# Altium schematic symbol library SamacSys.SchLib: 58 symbols
Pins are listed as number, name and electrical type; pins without a type are passive.

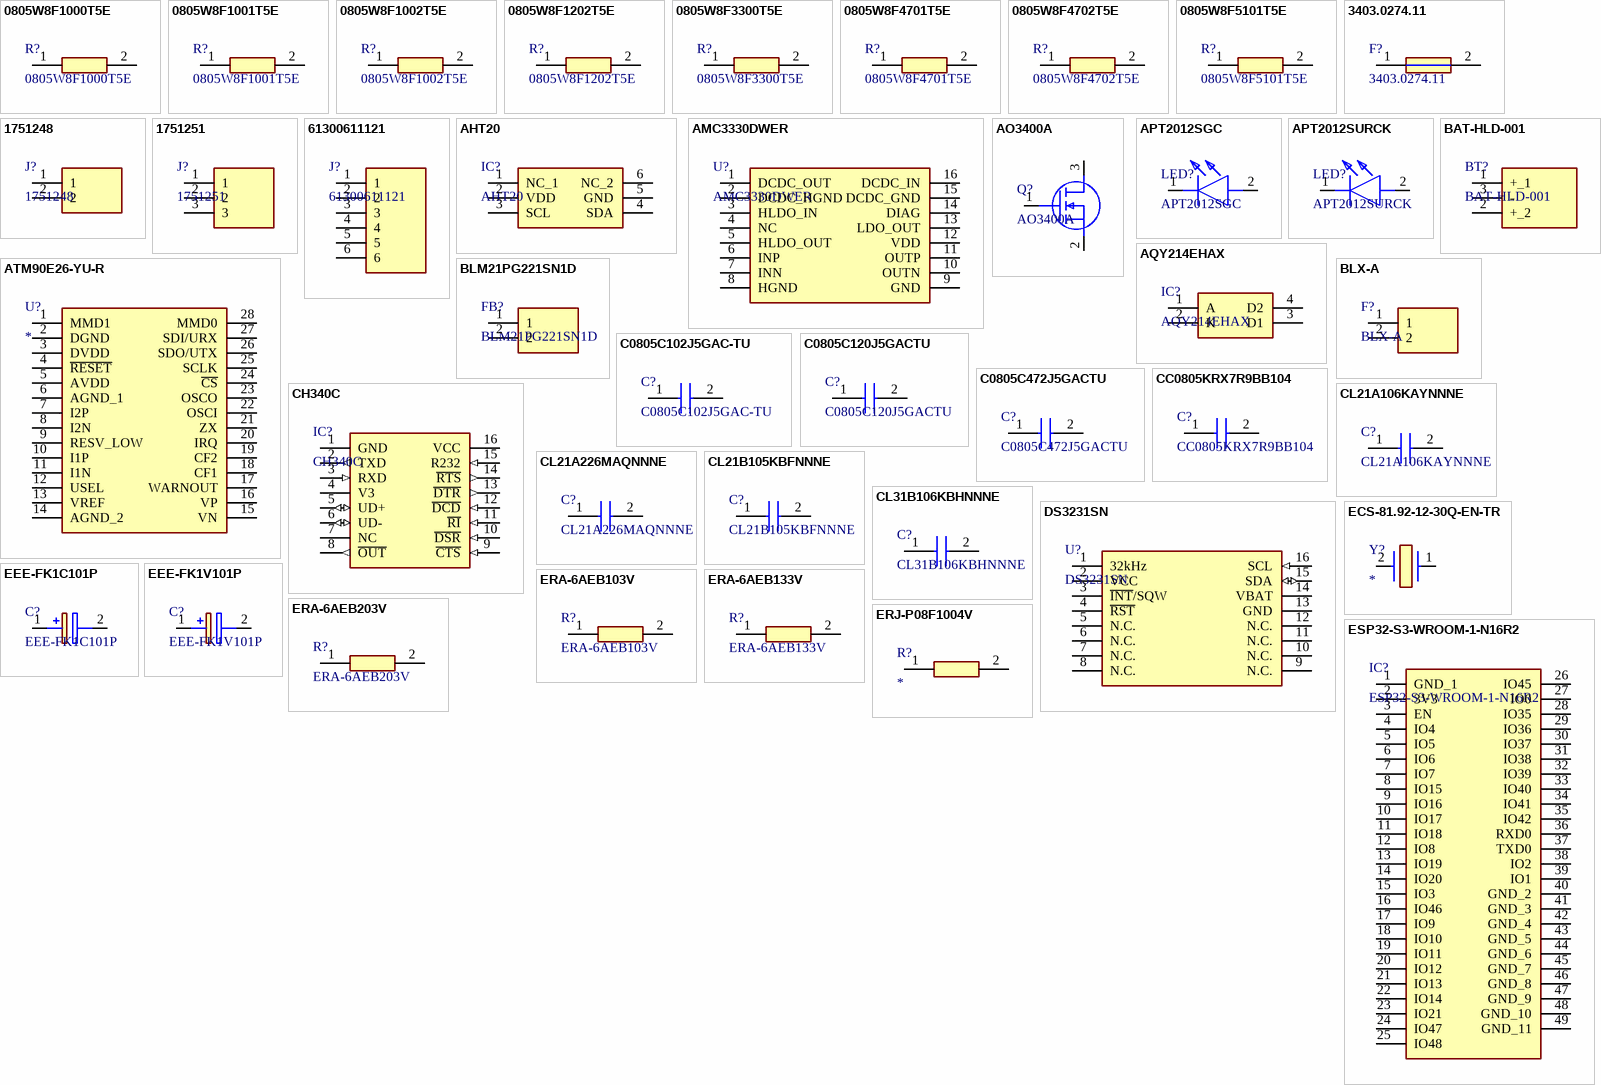
[diagram p0: symbols 0805W8F1000T5E to ESP32-S3-WROOM-1-N16R2]

## 0805W8F1000T5E
designator R?
Resistor 100 Ohm 1% 125 mW 0805; Manufacturer_Name: UNI-ROYAL; Value: 100R; Assembly: JLCPCB; Manufacturer_Part_Number: 0805W8F1000T5E; Supplier: JLCPCB; Supplier PN: LCSC C17408
footprint RESC2012X60N
pins: 1, 2

## 0805W8F1001T5E
designator R?
Resistor 1 kOhm 1% 125 mW 0805; Manufacturer_Name: UNI-ROYAL; Assembly: JLCPCB; Value: 1k; Manufacturer_Part_Number: 0805W8F1001T5E; Supplier: JLCPCB; Supplier PN: LCSC C17513
footprint RESC2012X60N
pins: 1, 2

## 0805W8F1002T5E
designator R?
Resistor 10 kOhm 1% 125 mW 0805; Manufacturer_Name: UNI-ROYAL; Value: 10k; Assembly: JLCPCB; Manufacturer_Part_Number: 0805W8F1002T5E; Supplier: JLCPCB; Supplier PN: LCSC C17414
footprint RESC2012X60N
pins: 1, 2

## 0805W8F1202T5E
designator R?
Resistor 12 kOhm 1% 125 mW 0805; Manufacturer_Name: UNI-ROYAL; Value: 12k; Assembly: JLCPCB; Manufacturer_Part_Number: 0805W8F1202T5E; Supplier: JLCPCB; Supplier PN: LCSC C17444
footprint RESC2012X60N
pins: 1, 2

## 0805W8F3300T5E
designator R?
Resistor 330 Ohm 1% 125 mW 0805; Manufacturer_Name: UNI-ROYAL; Value: 330R; Assembly: JLCPCB; Manufacturer_Part_Number: 0805W8F3300T5E; Supplier: JLCPCB; Supplier PN: LCSC C17630
footprint RESC2012X60N
pins: 1, 2

## 0805W8F4701T5E
designator R?
Resistor 4.7 kOhm 1% 125 mW 0805; Manufacturer_Name: UNI-ROYAL; Value: 4.7k; Assembly: JLCPCB; Manufacturer_Part_Number: 0805W8F4701T5E; Supplier: JLCPCB; Supplier PN: LCSC C17673
footprint RESC2012X60N
pins: 1, 2

## 0805W8F4702T5E
designator R?
Resistor 47 kOhm 1% 125 mW 0805; Manufacturer_Name: UNI-ROYAL; Value: 47k; Assembly: JLCPCB; Manufacturer_Part_Number: 0805W8F4702T5E; Supplier: JLCPCB; Supplier PN: LCSC C17713
footprint RESC2012X60N
pins: 1, 2

## 0805W8F5101T5E
designator R?
Resistor 5.1 kOhm 1% 125 mW 0805; Manufacturer_Name: UNI-ROYAL; Value: 5.1k; Assembly: JLCPCB; Manufacturer_Part_Number: 0805W8F5101T5E; Supplier: JLCPCB; Supplier PN: LCSC C27834
footprint RESC2012X60N
pins: 1, 2

## 3403.0274.11
designator F?
Fusible SMD UMT-H T1A 277 VAC, ruptura 1500 A (bolsa); Manufacturer_Name: Schurter; Assembly: JLCPCB; Manufacturer_Part_Number: 3403.0274.11; Supplier: JLCPCB; Supplier PN: LCSC C6384960; Value: T1A 277VAC
footprint 3403027423
pins: 1, 2

## 1751248
designator J?
Connector; Manufacturer_Name: Phoenix Contact; Assembly: JLCPCB; Value: 2P 3.5mm; Datasheet Link: https://www.phoenixcontact.com/en-us/products/printed-circuit-board-terminal-mkds-1-2-35-1751248?type=pdf; Height: 8.65mm; Manufacturer_Part_Number: 1751248; Supplier: JLCPCB; Supplier PN: LCSC C89122
footprint 1751248
pins: 1, 2

## 1751251
designator J?
Connector; Manufacturer_Name: Phoenix Contact; Value: 3P 3.5mm; Assembly: JLCPCB; Supplier: JLCPCB; Supplier PN: LCSC C91152; Datasheet Link: https://www.phoenixcontact.com/en-us/products/printed-circuit-board-terminal-mkds-1-3-35-1751251?type=pdf; Height: 8.65mm; Manufacturer_Part_Number: 1751251
footprint 1751251
pins: 1, 2, 3

## 61300611121
designator J?
Connector; Manufacturer_Name: Wurth Elektronik; Value: 1x6 2.54mm; Assembly: JLCPCB; Supplier: JLCPCB; Supplier PN: LCSC C5444523; Datasheet Link: https://www.we-online.com/components/products/datasheet/61300611121.pdf; Height: 8.94mm; Manufacturer_Part_Number: 61300611121
footprint HDRV6W79P0X254_1X6_1524X254X894P
pins: 1, 2, 3, 4, 5, 6

## AHT20
designator IC?
Temperature and humidity sensor, I2C 0x38, DFN-6 3x3 mm; Manufacturer_Name: Aosong; Value: T/HR I2C 0x38; Assembly: JLCPCB; Supplier: JLCPCB; Supplier PN: LCSC C2757850; Datasheet Link: https://www.lcsc.com/datasheet/C2757850.pdf; Height: 1.1mm; Manufacturer_Part_Number: AHT20
footprint AHT20
pins: 1 NC_1, 2 VDD, 3 SCL, 4 SDA, 5 GND, 6 NC_2

## AMC3330DWER
designator U?
Amplificador aislado +-1 V con DC/DC integrado, aislamiento reforzado, SOIC-16 DWE (carrete); Manufacturer_Name: Texas Instruments; Assembly: JLCPCB; Value: ±1V iso amp; Manufacturer_Part_Number: AMC3330DWER; Supplier: JLCPCB; Supplier PN: LCSC C2999368
footprint SOIC127P1030X265-16N
pins: 1 DCDC_OUT, 2 DCDC_HGND, 3 HLDO_IN, 4 NC, 5 HLDO_OUT, 6 INP, 7 INN, 8 HGND, 9 GND, 10 OUTN, 11 OUTP, 12 VDD, 13 LDO_OUT, 14 DIAG, 15 DCDC_GND, 16 DCDC_IN

## AO3400A
designator Q?
MOSFET N-channel 30V 5.7A, Rds(on) 48mR max at Vgs 2.5V, SOT-23; Manufacturer_Name: Alpha & Omega Semiconductor; Value: NMOS 30V 5.7A; Assembly: JLCPCB; Supplier: JLCPCB; Supplier PN: LCSC C20917; Datasheet Link: https://www.aosmd.com/res/datasheets/AO3400A.pdf; Manufacturer_Part_Number: AO3400A
footprint SOT96P237X111-3N
pins: 1 G, 2 S, 3 D

## APT2012SGC
designator LED?
LED; Manufacturer_Name: Kingbright; Assembly: JLCPCB; Value: verde; Datasheet Link: http://www.us.kingbright.com/images/catalog/SPEC/APT2012SGC.pdf; Height: 0.85mm; Manufacturer_Part_Number: APT2012SGC; Supplier: JLCPCB; Supplier PN: LCSC C5353439
footprint LEDC2012X85N
pins: 1 K, 2 A

## APT2012SURCK
designator LED?
LED; Manufacturer_Name: Kingbright; Assembly: JLCPCB; Value: rojo; Manufacturer_Part_Number: APT2012SURCK; Supplier: JLCPCB; Supplier PN: LCSC C5875730
footprint LEDC2012X85N
pins: 1 K, 2 A

## AQY214EHAX
designator IC?
PhotoMOS 1 Form A (NO), 400 V 120 mA, reinforced insulation 5000 Vrms, SMD DIP-4; Manufacturer_Name: Panasonic; Value: PhotoMOS NA; Assembly: JLCPCB; Supplier: JLCPCB; Supplier PN: LCSC C371971; Manufacturer_Part_Number: AQY214EHAX
footprint SOP254P962X315-4N
pins: 1 A, 2 K, 3 D1, 4 D2

## ATM90E26-YU-R
designator U?
Integrated Circuit; Manufacturer_Name: Microchip; Manufacturer_Part_Number: ATM90E26-YU-R; Assembly: JLCPCB; Value: energy meter; Datasheet Link: http://ww1.microchip.com/downloads/en/DeviceDoc/Atmel-46002-SE-M90E26-Datasheet.pdf; Height: 1.99mm; Supplier: JLCPCB; Supplier PN: LCSC C616398
footprint SOP65P778X199-28N
pins: 1 MMD1, 2 DGND, 3 DVDD, 4 ~{RESET}, 5 AVDD, 6 AGND_1, 7 I2P, 8 I2N, 9 RESV_LOW, 10 I1P, 11 I1N, 12 USEL, 13 VREF, 14 AGND_2, 15 VN, 16 VP, 17 WARNOUT, 18 CF1, 19 CF2, 20 IRQ, 21 ZX, 22 OSCI, 23 OSCO, 24 ~{CS}, 25 SCLK, 26 SDO/UTX, 27 SDI/URX, 28 MMD0

## BAT-HLD-001
designator BT?
Battery holder CR2032, SMD; Manufacturer_Name: TE Connectivity; Assembly: JLCPCB; Value: CR2032; Supplier: JLCPCB; Supplier PN: LCSC C7501066; Datasheet Link: https://www.te.com/commerce/DocumentDelivery/DDEController?Action=showdoc&DocId=Customer+Drawing%7FC-BAT-HLD-001-xx%7FE%7Fpdf%7FEnglish%7FENG_CD_C-BAT-HLD-001-xx_E.pdf%7FBAT-HLD-001; Height: 4.3mm; Manufacturer_Part_Number: BAT-HLD-001
footprint BATHLD001
pins: 1 +_1, 2 +_2, 3 -

## BLM21PG221SN1D
designator FB?
Ferrite Bead; Manufacturer_Name: Murata; Assembly: JLCPCB; Value: 220R@100MHz; Datasheet Link: https://datasheet.datasheetarchive.com/originals/dk/DKDS-31/605570.pdf; Height: 1.05mm; Manufacturer_Part_Number: BLM21PG221SN1D; Supplier: JLCPCB; Supplier PN: LCSC C85840
footprint BEADC2012X105N
pins: 1, 2

## BLX-A
designator F?
Portafusible 5x20 mm para PCB, 2 pines a 22 mm (XC Electronics BLX-A, LCSC C3131); Assembly: DNP; Value: 5x20 6.3A 250V; Manufacturer_Name: XC Electronics; Manufacturer_Part_Number: BLX-A; Supplier: Sigma; Supplier PN: BLX-A
footprint BLX-A_5X20
pins: 1, 2

## C0805C102J5GAC-TU
designator C?
Capacitor; Manufacturer_Name: KEMET; Manufacturer_Part_Number: C0805C102J5GACTU; Assembly: JLCPCB; Value: 1nF 50V C0G; Datasheet Link: https://www.kemet.com/specsheet/C0805C102J5GACTU; Height: 0.88mm; Supplier: JLCPCB; Supplier PN: LCSC C2167084
footprint CAPC2012X88N
pins: 1, 2

## C0805C120J5GACTU
designator C?
Capacitor; Manufacturer_Name: KEMET; Assembly: JLCPCB; Value: 12pF 50V C0G; Datasheet Link: https://www.kemet.com/specsheet/C0805C120J5GACTU; Height: 0.88mm; Manufacturer_Part_Number: C0805C120J5GACTU; Supplier: JLCPCB; Supplier PN: LCSC C2168859
footprint CAPC2012X88N
pins: 1, 2

## C0805C472J5GACTU
designator C?
Capacitor; Manufacturer_Name: KEMET; Assembly: JLCPCB; Value: 4.7nF 50V C0G; Datasheet Link: https://www.kemet.com/specsheet/C0805C472J5GACTU; Height: 0.88mm; Manufacturer_Part_Number: C0805C472J5GACTU; Supplier: JLCPCB; Supplier PN: LCSC C2170898
footprint CAPC2012X88N
pins: 1, 2

## CC0805KRX7R9BB104
designator C?
Capacitor 100 nF 50 V X7R 10% 0805; Manufacturer_Name: YAGEO; Assembly: JLCPCB; Manufacturer_Part_Number: CC0805KRX7R9BB104; Supplier: JLCPCB; Supplier PN: LCSC C49678; Value: 100nF 50V X7R
footprint CAPC2012X88N
pins: 1, 2

## CH340C
designator IC?
USB to UART bridge; Manufacturer_Name: WCH; Value: USB-UART; Assembly: JLCPCB; Supplier PN: LCSC C84681; Supplier: JLCPCB; Datasheet Link: https://www.wch-ic.com/downloads/CH340DS1_PDF.html; Height: 1.75mm; Manufacturer_Part_Number: CH340C
footprint SOIC127P600X175-16N
pins: 1 GND (power), 2 TXD (out), 3 RXD (in), 4 V3 (power), 5 UD+ (io), 6 UD- (io), 7 NC, 8 ~{OUT} (out), 9 ~{CTS} (in), 10 ~{DSR} (in), 11 ~{RI} (in), 12 ~{DCD} (in), 13 ~{DTR} (out), 14 ~{RTS} (out), 15 R232 (in), 16 VCC (power)

## CL21A106KAYNNNE
designator C?
Capacitor; Manufacturer_Name: Samsung Electro-Mechanics; Assembly: JLCPCB; Value: 10uF 25V; Datasheet Link: https://datasheet.datasheetarchive.com/originals/distributors/Datasheets_SAMA/6a45835c9b7400e9b49c55c38a8ff4a2.pdf; Height: 1.45mm; Manufacturer_Part_Number: CL21A106KAYNNNE; Supplier: JLCPCB; Supplier PN: LCSC C15850
footprint CAPC2012X145N
pins: 1, 2

## CL21A226MAQNNNE
designator C?
Capacitor; Manufacturer_Name: Samsung Electro-Mechanics; Assembly: JLCPCB; Value: 22uF 25V; Datasheet Link: https://datasheet.datasheetarchive.com/originals/distributors/Datasheets-DGA10/2406310.pdf; Height: 1.4mm; Manufacturer_Part_Number: CL21A226MAQNNNE; Supplier: JLCPCB; Supplier PN: LCSC C45783
footprint CAPC2012X140N
pins: 1, 2

## CL21B105KBFNNNE
designator C?
Capacitor 1 uF 50 V X7R 10% 0805; Manufacturer_Name: Samsung Electro-Mechanics; Assembly: JLCPCB; Manufacturer_Part_Number: CL21B105KBFNNNE; Supplier: JLCPCB; Supplier PN: LCSC C28323; Value: 1uF 50V X7R
footprint CAPC2012X88N
pins: 1, 2

## CL31B106KBHNNNE
designator C?
Capacitor; Manufacturer_Name: Samsung Electro-Mechanics; Assembly: JLCPCB; Value: 10uF 50V; Datasheet Link: https://datasheet.datasheetarchive.com/originals/distributors/DKDS-19/375194.pdf; Height: 1.8mm; Manufacturer_Part_Number: CL31B106KBHNNNE; Supplier: JLCPCB; Supplier PN: LCSC C89632
footprint CAPC3216X180N
pins: 1, 2

## DS3231SN
designator U?
I2C RTC with integrated TCXO and crystal, VBAT, SO-16W; Manufacturer_Name: Analog Devices; Manufacturer_Part_Number: DS3231SN#T&R; Assembly: JLCPCB; Value: RTC TCXO 2ppm; Datasheet Link: https://www.analog.com/media/en/technical-documentation/data-sheets/DS3231.pdf; Height: 2.65mm; Supplier: JLCPCB; Supplier PN: LCSC C9866
footprint SOIC127P1030X265-16N
pins: 1 32kHz (oc), 2 VCC (power), 3 ~{INT}/SQW (oc), 4 ~{RST} (oc), 5 N.C., 6 N.C., 7 N.C., 8 N.C., 9 N.C., 10 N.C., 11 N.C., 12 N.C., 13 GND (power), 14 VBAT (power), 15 SDA (io), 16 SCL (in)

## ECS-81.92-12-30Q-EN-TR
designator Y?
Crystal or Oscillator; Manufacturer_Name: ECS; Manufacturer_Part_Number: ECS-81.92-12-30Q-EN-TR; Assembly: JLCPCB; Value: 8.192MHz 12pF; Datasheet Link: https://datasheet.datasheetarchive.com/originals/distributors/Datasheets_SAMA/a25c19192314839168edce8dcea0d59f.pdf; Height: 1.1mm; Supplier: JLCPCB; Supplier PN: LCSC C2450755
footprint ECS81921230QENTR
pins: 1 IN/OUT, 2 OUT/IN

## EEE-FK1C101P
designator C?
Capacitor Polarised; Manufacturer_Name: Panasonic; Assembly: JLCPCB; Value: 100uF 16V; Datasheet Link: http://industrial.panasonic.com/cdbs/www-data/pdf/RDE0000/ABA0000C1181.pdf; Height: 7.8mm; Manufacturer_Part_Number: EEE-FK1C101P; Supplier: JLCPCB; Supplier PN: LCSC C128532
footprint EEE1AA101SP
pins: 1 +, 2 -

## EEE-FK1V101P
designator C?
Capacitor Polarised; Manufacturer_Name: Panasonic; Assembly: JLCPCB; Value: 100uF 35V; Datasheet Link: http://industrial.panasonic.com/cdbs/www-data/pdf/RDE0000/ABA0000C1181.pdf; Height: 10.8mm; Manufacturer_Part_Number: EEE-FK1V101P; Supplier: JLCPCB; Supplier PN: LCSC C128462
footprint EEHZT1E331UP
pins: 1 +, 2 -

## ERA-6AEB103V
designator R?
Resistor; Manufacturer_Name: Panasonic; Value: 10k 0.1%; Assembly: JLCPCB; Height: 0.55mm; Manufacturer_Part_Number: ERA-6AEB103V; Supplier: JLCPCB; Supplier PN: LCSC C191101
footprint RESC2012X60N
pins: 1, 2

## ERA-6AEB133V
designator R?
Resistor; Manufacturer_Name: Panasonic; Value: 13k 0.1%; Assembly: JLCPCB; Height: 0.55mm; Manufacturer_Part_Number: ERA-6AEB133V; Supplier: JLCPCB; Supplier PN: LCSC C445658
footprint RESC2012X60N
pins: 1, 2

## ERA-6AEB203V
designator R?
Resistor; Manufacturer_Name: Panasonic; Value: 20k 0.1%; Assembly: JLCPCB; Height: 0.55mm; Manufacturer_Part_Number: ERA-6AEB203V; Supplier: JLCPCB; Supplier PN: LCSC C473304
footprint RESC2012X60N
pins: 1, 2

## ERJ-P08F1004V
designator R?
Resistor; Manufacturer_Name: Panasonic; Manufacturer_Part_Number: ERJ-P08F1004V; Assembly: JLCPCB; Value: 1M 1206; Datasheet Link: http://industrial.panasonic.com/cdbs/www-data/pdf/RDO0000/AOA0000C331.pdf; Height: 0.7mm; Supplier: JLCPCB; Supplier PN: LCSC C41369755
footprint ERJP08_(1206)
pins: 1, 2

## ESP32-S3-WROOM-1-N16R2
designator IC?
Integrated Circuit; Manufacturer_Name: Espressif Systems; Value: N16R2 16MB/2MB; Assembly: JLCPCB; Supplier: JLCPCB; Supplier PN: LCSC C2913205; Datasheet Link: https://www.espressif.com/sites/default/files/documentation/esp32-s3-wroom-1_wroom-1u_datasheet_en.pdf; Height: 3.25mm; Manufacturer_Part_Number: ESP32-S3-WROOM-1-N16R2
footprint ESP32S3WROOM1N16R2
pins: 1 GND_1, 2 3V3, 3 EN, 4 IO4, 5 IO5, 6 IO6, 7 IO7, 8 IO15, 9 IO16, 10 IO17, 11 IO18, 12 IO8, 13 IO19, 14 IO20, 15 IO3, 16 IO46, 17 IO9, 18 IO10, 19 IO11, 20 IO12, 21 IO13, 22 IO14, 23 IO21, 24 IO47, 25 IO48, 26 IO45, 27 IO0, 28 IO35, 29 IO36, 30 IO37, 31 IO38, 32 IO39, 33 IO40, 34 IO41, 35 IO42, 36 RXD0, 37 TXD0, 38 IO2, 39 IO1, 40 GND_2, 41 GND_3, 42 GND_4, 43 GND_5, 44 GND_6, 45 GND_7, 46 GND_8, 47 GND_9, 48 GND_10, 49 GND_11

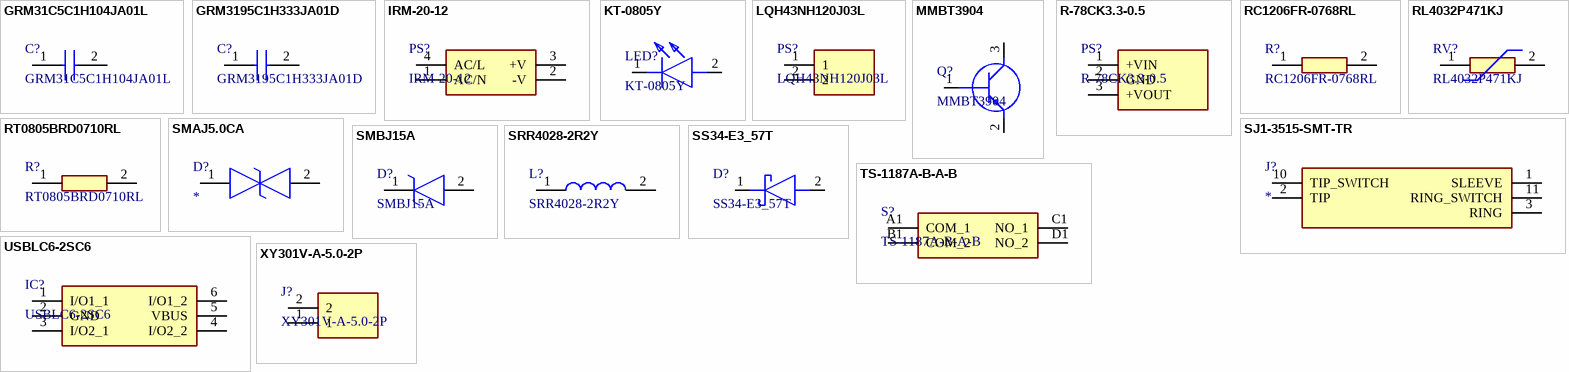
[diagram p1: symbols GRM31C5C1H104JA01L to XY301V-A-5.0-2P]

## GRM31C5C1H104JA01L
designator C?
Capacitor ceramico 100 nF 50 V C0G 5% 1206; Manufacturer_Name: Murata; Assembly: JLCPCB; Manufacturer_Part_Number: GRM31C5C1H104JA01L; Supplier: JLCPCB; Supplier PN: LCSC C97946; Value: 100nF 50V C0G
footprint CAPC3216X180N
pins: 1, 2

## GRM3195C1H333JA01D
designator C?
Capacitor ceramico 33 nF 50 V C0G 5% 1206; Manufacturer_Name: Murata; Assembly: JLCPCB; Manufacturer_Part_Number: GRM3195C1H333JA01D; Supplier: JLCPCB; Supplier PN: LCSC C97930; Value: 33nF 50V C0G
footprint CAPC3216X180N
pins: 1, 2

## IRM-20-12
designator PS?
Power Supply; Manufacturer_Name: Mean Well; Assembly: JLCPCB; Value: 12V 1.8A; Datasheet Link: https://www.meanwell.com/Upload/PDF/IRM-20/IRM-20-SPEC.PDF; Height: 24mm; Manufacturer_Part_Number: IRM-20-12; Supplier: JLCPCB; Supplier PN: LCSC C5278499
footprint IRM2012
pins: 1 AC/N, 2 -V, 3 +V, 4 AC/L

## KT-0805Y
designator LED?
LED yellow 0805, 590 nm; Manufacturer_Name: Hubei KENTO Electronic; Assembly: JLCPCB; Value: amarillo; Manufacturer_Part_Number: KT-0805Y; Supplier: JLCPCB; Supplier PN: LCSC C2296; Datasheet Link: https://www.lcsc.com/datasheet/C2296.pdf
footprint LEDC2012X85N
pins: 1 K, 2 A

## LQH43NH120J03L
designator PS?
Inductor 12 uH 5% 420 mA 0.25 ohm 1812, AEC-Q200; Manufacturer_Name: Murata; Assembly: JLCPCB; Value: 12uH; Manufacturer_Part_Number: LQH43NH120J03L; Supplier: JLCPCB; Supplier PN: LCSC C3224514
footprint RLS126
pins: 1, 2

## MMBT3904
designator Q?
Transistor BJT NPN 40 V 200 mA, SOT-23; Manufacturer_Name: Jiangsu Changjing Electronics; Value: NPN 40V 0.2A; Assembly: JLCPCB; Supplier: JLCPCB; Supplier PN: LCSC C20526; Manufacturer_Part_Number: MMBT3904
footprint SOT96P237X111-3N
pins: 1 B, 2 E, 3 C

## R-78CK3.3-0.5
designator PS?
Regulador conmutado 3.3 V 0.5 A, SIP3; Manufacturer_Name: RECOM Power; Assembly: Manual; Datasheet Link: https://recom-power.com/pdf/Innoline/R-78CK-0.5.pdf; Height: 10.7mm; Manufacturer_Part_Number: R-78CK3.3-0.5; Supplier: Disponible; Supplier PN: -; Value: 3.3V 0.5A
footprint R78CK3305
pins: 1 +VIN, 2 GND, 3 +VOUT

## RC1206FR-0768RL
designator R?
Resistor; Manufacturer_Name: Yageo; Assembly: JLCPCB; Value: 68R 1206; Manufacturer_Part_Number: RC1206FR-0768RL; Supplier: JLCPCB; Supplier PN: LCSC C137238
footprint ERJP08_(1206)
pins: 1, 2

## RL4032P471KJ
designator RV?
Varistor SMD 300 VAC, 470 V, 2500 A (8/20 us), 30 J, 4032; Manufacturer_Name: Ruilon; Assembly: JLCPCB; Value: 300VAC; Manufacturer_Part_Number: RL4032P471KJ; Supplier: JLCPCB; Supplier PN: LCSC C2935514
footprint CU4032
pins: 1, 2

## RT0805BRD0710RL
designator R?
Resistencia de pelicula delgada 10 ohm 0.1% 25 ppm 0805; Manufacturer_Name: Yageo; Value: 10R 0.1%; Assembly: JLCPCB; Manufacturer_Part_Number: RT0805BRD0710RL; Supplier: JLCPCB; Supplier PN: LCSC C865142
footprint RESC2012X60N
pins: 1, 2

## SJ1-3515-SMT-TR
designator J?
Connector; Manufacturer_Name: Same Sky; Manufacturer_Part_Number: SJ1-3515-SMT-TR; Assembly: JLCPCB; Value: jack 3.5mm; Datasheet Link: https://www.sameskydevices.com/product/resource/sj1-351x-smt.pdf; Height: 5.3mm; Supplier: JLCPCB; Supplier PN: LCSC C22359767
footprint SJ13515SMTTR
pins: 1 SLEEVE, 2 TIP, 3 RING, 10 TIP_SWITCH, 11 RING_SWITCH

## SMAJ5.0CA
designator D?
TVS Diode (Bi-directional); Manufacturer_Name: Littelfuse; Manufacturer_Part_Number: SMAJ5.0CA; Assembly: JLCPCB; Value: 5V TVS bidir; Datasheet Link: http://www.littelfuse.com/~/media/electronics/datasheets/tvs_diodes/littelfuse_tvs_diode_smaj_datasheet.pdf.pdf; Height: 2.29mm; Supplier: JLCPCB; Supplier PN: LCSC C83324
footprint DIONM5026X229N
pins: 1, 2

## SMBJ15A
designator D?
TVS Diode (Uni-directional); Manufacturer_Name: Littelfuse; Assembly: JLCPCB; Value: 15V 600W; Datasheet Link: http://www.vishay.com/docs/88392/smbj.pdf; Height: 2.44mm; Manufacturer_Part_Number: SMBJ15A; Supplier: JLCPCB; Supplier PN: LCSC C83846
footprint DIOM5436X244N
pins: 1 K, 2 A

## SRR4028-2R2Y
designator L?
Inductor; Manufacturer_Name: Bourns; Assembly: JLCPCB; Value: 2.2uH; Datasheet Link: https://www.bourns.com/pdfs/SRR4028.pdf; Manufacturer_Part_Number: SRR4028-2R2Y; Supplier: JLCPCB; Supplier PN: LCSC C2041777
footprint SRR4028
pins: 1, 2

## SS34-E3_57T
designator D?
Schottky Diode; Manufacturer_Name: Vishay; Manufacturer_Part_Number: SS34-E3/57T; Assembly: JLCPCB; Value: 40V 3A; Datasheet Link: https://www.vishay.com/docs/88751/ss32.pdf; Height: 2.62mm; Supplier: JLCPCB; Supplier PN: LCSC C13354
footprint DIOM7959X262N
pins: 1 K, 2 A

## TS-1187A-B-A-B
designator S?
Tact switch 5.1 x 5.1 x 1.5 mm, 160 gf, 50 mA 12 VDC; Manufacturer_Name: XKB Connectivity; Value: pulsador 5.1mm; Assembly: JLCPCB; Supplier: JLCPCB; Supplier PN: LCSC C318884; Datasheet Link: http://www.helloxkb.com/public/images/pdf/TS-1187A-X-X-X.pdf; Height: 4.05mm; Manufacturer_Part_Number: TS-1187A-B-A-B
footprint TS1187ABAB
pins: A1 COM_1, B1 COM_2, C1 NO_1, D1 NO_2

## USBLC6-2SC6
designator IC?
Integrated Circuit; Manufacturer_Name: STMicroelectronics; Value: ESD USB; Assembly: JLCPCB; Supplier: JLCPCB; Supplier PN: LCSC C7519; Datasheet Link: https://www.st.com/resource/en/datasheet/usblc6-2.pdf; Height: 1.45mm; Manufacturer_Part_Number: USBLC6-2SC6
footprint SOT95P280X145-6N
pins: 1 I/O1_1, 2 GND, 3 I/O2_1, 4 I/O2_2, 5 VBUS, 6 I/O1_2

## XY301V-A-5.0-2P
designator J?
Bornera de tornillo 2 polos, paso 5.0 mm, 300 V 15 A, 22-14 AWG; Manufacturer_Name: Xinlaiya; Assembly: JLCPCB; Value: 2P 5.0mm 300V; Manufacturer_Part_Number: XY301V-A-5.0-2P; Supplier: JLCPCB; Supplier PN: LCSC C557651
footprint TB001-500-02BE
pins: 1, 2